# Altium footprint library DC550200-1095-2H.PcbLib: 1 footprints
Each footprint in its own frame and in the unit in brackets; x right, y up, seen from the top. Pads: shape width x height; smd on the part's side, far side on the other; paste and mask are expansions set on the pad; w line width, h text height; cw(c..) or ccw(c..) is an arc to the next point about the centre after c.
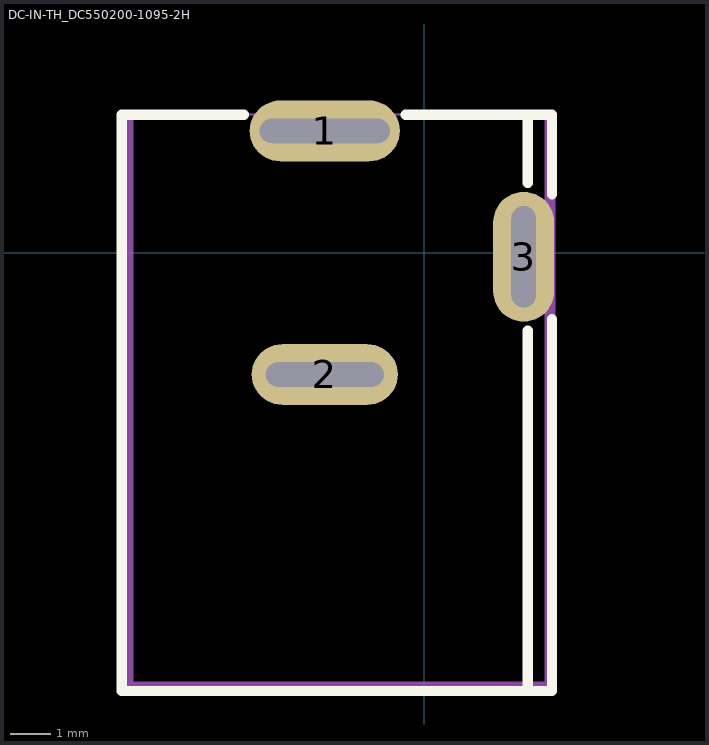
[diagram p0: the footprint, top view; thin cyan lines are the x and y axes]

## DC-IN-TH_DC550200-1095-2H [mm]
pads (3):
  oval 3.7x1.5 hole 0.6 slot 3.2 at 0 deg: 1(-2.45,3)
  oval 3.6x1.5 hole 0.6 slot 2.9 at 0 deg: 2(-2.45,-3)
  oval 1.5x3.2 hole 0.6 slot 2.5 at 90 deg: 3(2.45,-0.1)
Top Overlay:
  lines w0.254: -4.446,3.4 -7.45,3.4 -7.45,-10.8 2.55,-10.8 ; -0.454,3.4 2.55,3.4 ; 2.55,-1.926 2.55,-10.8 ; 2.55,1.726 2.55,3.4 ; 3.15,-1.636 3.15,-10.8 2.55,-10.8 ; 3.15,1.436 3.15,3.4 2.55,3.4
Mechanical 2:
  region: -7.173,3.3 -7.173,-10.573 2.973,-10.573 2.973,3.3 2.983,3.349 3.01,3.39 3.051,3.417 3.1,3.427 3.149,3.417 3.19,3.39 3.217,3.349 3.227,3.3 3.227,-10.7 3.217,-10.749 3.19,-10.79 3.149,-10.817 3.1,-10.827 -7.3,-10.827 -7.349,-10.817 -7.39,-10.79 -7.417,-10.749 -7.427,-10.7 -7.427,3.3 -7.417,3.349 -7.39,3.39 -7.349,3.417 -7.3,3.427 -7.251,3.417 -7.21,3.39 -7.183,3.349
Mechanical 6:
  lines w0.051: -7.45,-10.8 3.15,-10.8 3.15,3.4 -7.45,3.4 -7.45,-10.8
Mechanical 8:
  region: -7.39,3.4 -7.39,3.375 -7.425,3.34 -7.475,3.34 -7.51,3.375 -7.51,3.4 -7.51,3.425 -7.475,3.46 -7.425,3.46 -7.39,3.425 -7.39,3.4
Mechanical 9:
  region: 2.6,0.9 2.6,-1.1 2.3,-1.1 2.3,0.9
  region: -1.25,-3.15 -3.65,-3.15 -3.65,-2.85 -1.25,-2.85
  region: -3.8,3.15 -1.1,3.15 -1.1,2.85 -3.8,2.85